# EAGLE library part RM106772BCB (library RM106772BCB)
Rotary Switches .2A 48VDC 6pos Stop 7.7mm Act 270gf Source: Datasheet <https://www.digikey.ph/en/products/detail/c-k/RM106772BCB/6052015>
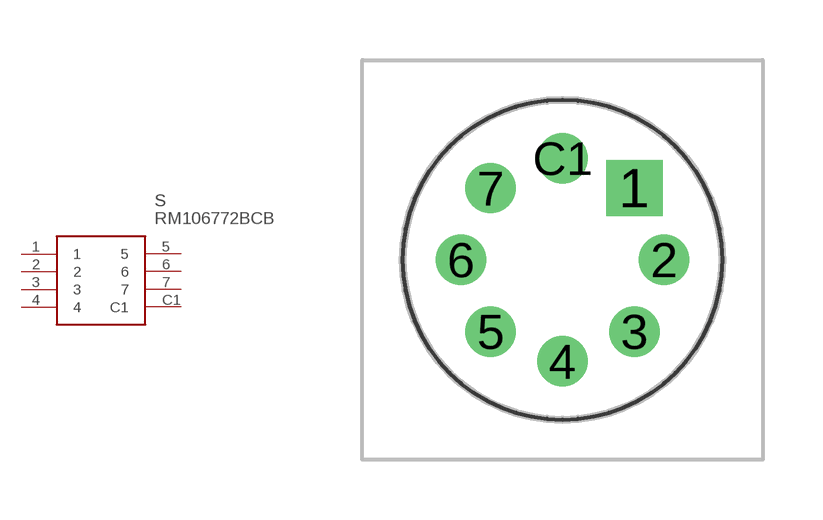
[diagram p0: symbol with the pads of RM106772BCB; footprint RM106772BCB]

Designator prefix S

## RM106772BCB (Description: Rotary Switches .2A 48VDC 6pos Stop 7.7mm Act 270gf; Height: 15.1mm; Manufacturer_Name: LITTELFUSE; Manufacturer_Part_Number: RM106772BCB; Mouser_Part_Number: 611-RM106772BCB; Mouser_Price-Stock: https://www.mouser.co.uk/ProductDetail/CK/RM106772BCB?qs=367PjNmvCmlxoAu0%2F1HoEg%3D%3D)  [RM106772BCB]
1  1
2  2
3  3
4  4
5  5
6  6
7  7
C1  C1

## Footprint RM106772BCB (pad centres in mm)
RM106772BCB
drill 0.9 pad 1.4 square: 1 0,0
drill 0.75 pad 1.2: 2 0.744,-1.796; 3 0,-3.592; 4 -1.796,-4.336; 5 -3.592,-3.592; 6 -4.336,-1.796; 7 -3.592,0; C1 -1.796,0.744